# Altium integrated library CRCW2512220RJNEGHP.IntLib: 1 symbol
Pins are listed as number, name and electrical type; pins without a type are passive.

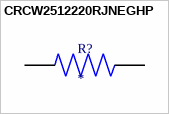
[diagram p0: symbol CRCW2512220RJNEGHP]

## CRCW2512220RJNEGHP
designator R?
220 Ohms Â±5% 1.5W Chip Resistor 2512 (6432 Metric) Automotive AEC-Q200, Pulse Withstanding Thick Film; MF: Vishay; MP: CRCW2512220RJNEGHP; SnapEDA_Link: https://www.snapeda.com/parts/CRCW2512220RJNEGHP/Vishay/view-part/?ref=snap; Package: 6331 Vishay; Value: *; Check_prices: https://www.snapeda.com/parts/CRCW2512220RJNEGHP/Vishay/view-part/?ref=eda
footprint RESC6331X70N
pins: 1, 2